# Altium footprint library header.PcbLib: 139 footprints (part 5 of 9)
Each footprint in its own frame and in the unit in brackets; x right, y up, seen from the top. Pads: shape width x height; smd on the part's side, far side on the other; paste and mask are expansions set on the pad; w line width, h text height; cw(c..) or ccw(c..) is an arc to the next point about the centre after c.
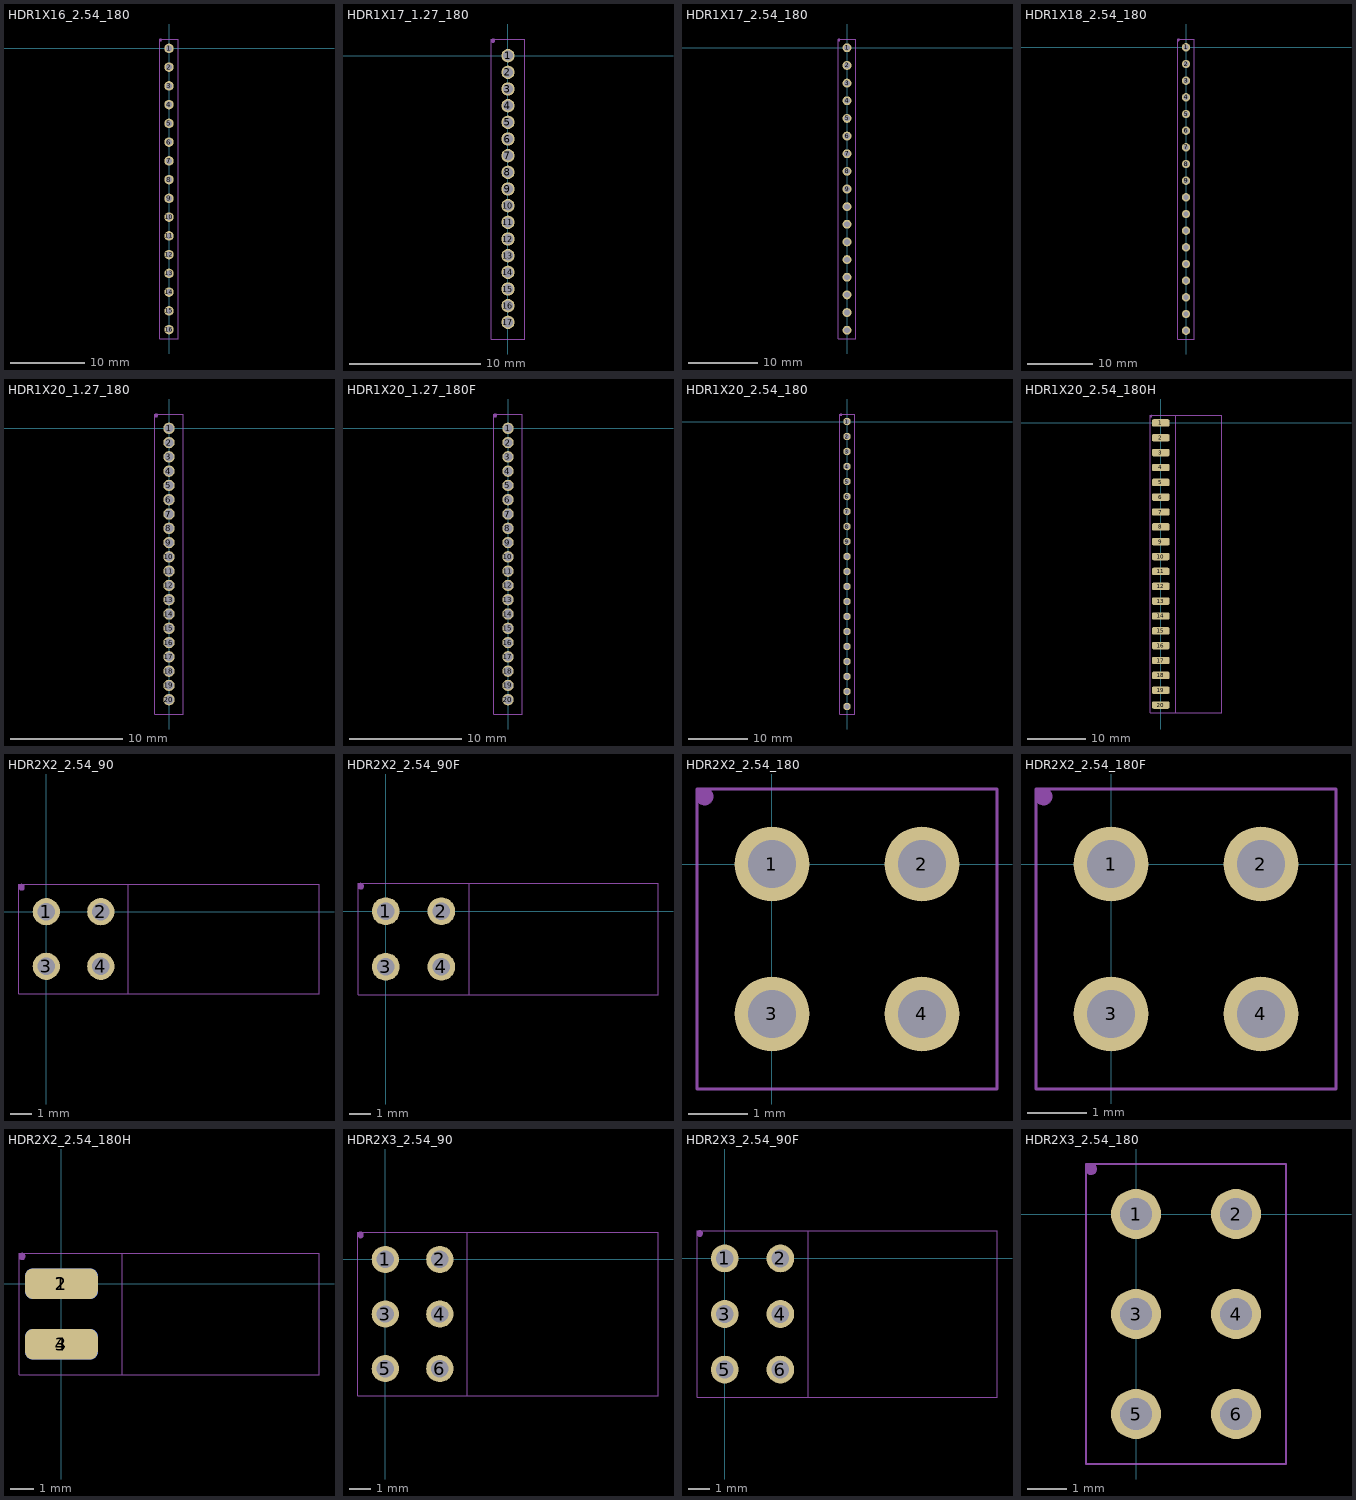
[diagram p4: the footprints below, top view; thin cyan lines are the x and y axes]

## HDR1X16_2.54_180 [mil]
height 169.29
pads (16):
  round 50 hole 32: 1(0,0) 2(0,-100) 3(0,-200) 4(0,-300) 5(0,-400) 6(0,-500) 7(0,-600) 8(0,-700) 9(0,-800) 10(0,-900) 11(0,-1000) 12(0,-1100) 13(0,-1200) 14(0,-1300) 15(0,-1400) 16(0,-1500)
Mechanical 13:
  lines w2: -50,-1550 -50,50 50,50 50,-1550 -50,-1550
Top Component (Mech14):
  circle w2: c-45,45 r5
  region: -45,40 -45.99,40 -47.83,40.76 -49.24,42.17 -50,44.01 -50,45 -50,45.99 -49.24,47.83 -47.83,49.24 -45.99,50 -45,50 -44.01,50 -42.17,49.24 -40.76,47.83 -40,45.99 -40,45 -40,44.01 -40.76,42.17 -42.17,40.76 -44.01,40
  lines w2: -50,-1550 -50,50 50,50 50,-1550 -50,-1550
  text ".Designator" at -31,-770 h80
3D body "pin_header_aw140-eg-g16d.stp": height 322.83, standoff -118.11, extent -49.18,-1550 49.18,50

## HDR1X17_1.27_180 [mil]
height 169.29
pads (17):
  round 40 hole 30: 1(0,0) 2(0,-50) 3(0,-100) 4(0,-150) 5(0,-200) 6(0,-250) 7(0,-300) 8(0,-350) 9(0,-400) 10(0,-450) 11(0,-500) 12(0,-550) 13(0,-600) 14(0,-650) 15(0,-700) 16(0,-750) 17(0,-800)
Mechanical 13:
  lines w2: -50,-850 50,-850 50,50 -50,50 -50,-850
Top Component (Mech14):
  circle w2: c-45,45 r5
  region: -45,40 -45.99,40 -47.83,40.76 -49.24,42.17 -50,44.01 -50,45 -50,45.99 -49.24,47.83 -47.83,49.24 -45.99,50 -45,50 -44.01,50 -42.17,49.24 -40.76,47.83 -40,45.99 -40,45 -40,44.01 -40.76,42.17 -42.17,40.76 -44.01,40
  lines w2: -50,-850 -50,50 50,50 50,-850 -50,-850
  text ".Designator" at -31,-420 h80
3D body "pin_header_a-sl127-eg-g17d.stp": height 210.24, standoff -102.36, extent -49.21,-824.99 49.21,25.01

## HDR1X17_2.54_180 [mil]
height 169.29
pads (17):
  round 50 hole 32: 1(0,0) 2(0,-100) 3(0,-200) 4(0,-300) 5(0,-400) 6(0,-500) 7(0,-600) 8(0,-700) 9(0,-800) 10(0,-900) 11(0,-1000) 12(0,-1100) 13(0,-1200) 14(0,-1300) 15(0,-1400) 16(0,-1500) 17(0,-1600)
Mechanical 13:
  lines w2: -50,-1650 50,-1650 50,50 -50,50 -50,-1650
Top Component (Mech14):
  circle w2: c-45,45 r5
  region: -45,40 -45.99,40 -47.83,40.76 -49.24,42.17 -50,44.01 -50,45 -50,45.99 -49.24,47.83 -47.83,49.24 -45.99,50 -45,50 -44.01,50 -42.17,49.24 -40.76,47.83 -40,45.99 -40,45 -40,44.01 -40.76,42.17 -42.17,40.76 -44.01,40
  lines w2: -50,-1650 50,-1650 50,50 -50,50 -50,-1650
  text ".Designator" at -31,-820 h80
3D body "pin_header_aw140-eg-g17d.stp": height 322.83, standoff -118.11, extent -49.18,-1650 49.18,50

## HDR1X18_2.54_180 [mil]
height 169.29
pads (18):
  round 50 hole 32: 1(0,0) 2(0,-100) 3(0,-200) 4(0,-300) 5(0,-400) 6(0,-500) 7(0,-600) 8(0,-700) 9(0,-800) 10(0,-900) 11(0,-1000) 12(0,-1100) 13(0,-1200) 14(0,-1300) 15(0,-1400) 16(0,-1500) 17(0,-1600) 18(0,-1700)
Mechanical 13:
  lines w2: -50,-1750 50,-1750 50,50 -50,50 -50,-1750
Top Component (Mech14):
  circle w2: c-45,45 r5
  region: -45,40 -45.99,40 -47.83,40.76 -49.24,42.17 -50,44.01 -50,45 -50,45.99 -49.24,47.83 -47.83,49.24 -45.99,50 -45,50 -44.01,50 -42.17,49.24 -40.76,47.83 -40,45.99 -40,45 -40,44.01 -40.76,42.17 -42.17,40.76 -44.01,40
  lines w2: -50,-1750 50,-1750 50,50 -50,50 -50,-1750
  text ".Designator" at -31,-870 h80
3D body "pin_header_aw140-eg-g18d.stp": height 322.83, standoff -118.11, extent -49.18,-1750 49.18,50

## HDR1X20_1.27_180 [mil]
height 169.29
pads (20):
  round 40 hole 30: 1(0,0) 2(0,-50) 3(0,-100) 4(0,-150) 5(0,-200) 6(0,-250) 7(0,-300) 8(0,-350) 9(0,-400) 10(0,-450) 11(0,-500) 12(0,-550) 13(0,-600) 14(0,-650) 15(0,-700) 16(0,-750) 17(0,-800) 18(0,-850) 19(-0.01,-900) 20(-0.01,-950)
Mechanical 13:
  lines w2: -50,-1000 50,-1000 50,50 -50,50 -50,-1000
Top Component (Mech14):
  circle w2: c-45,45 r5
  region: -45,40 -45.99,40 -47.83,40.76 -49.24,42.17 -50,44.01 -50,45 -50,45.99 -49.24,47.83 -47.83,49.24 -45.99,50 -45,50 -44.01,50 -42.17,49.24 -40.76,47.83 -40,45.99 -40,45 -40,44.01 -40.76,42.17 -42.17,40.76 -44.01,40
  lines w2: -50,-1000 50,-1000 50,50 -50,50 -50,-1000
  text ".Designator" at -31,-495 h80
3D body "pin_header_a-sl127-eg-g20d.stp": height 210.24, standoff -102.36, extent -49.65,-975 48.77,25

## HDR1X20_1.27_180F [mil]
height 169.29
pads (20):
  round 40 hole 30: 1(0,0) 2(0,-50) 3(0,-100) 4(0,-150) 5(0,-200) 6(0,-250) 7(0,-300) 8(0,-350) 9(0,-400) 10(0,-450) 11(0,-500) 12(0,-550) 13(0,-600) 14(0,-650) 15(0,-700) 16(0,-750) 17(0,-800) 18(0,-850) 19(-0.01,-900) 20(-0.01,-950)
Mechanical 13:
  lines w2: -50,-1000 -50,50 50,50 50,-1000 -50,-1000
Top Component (Mech14):
  circle w2: c-45,45 r5
  region: -45,40 -45.99,40 -47.83,40.76 -49.24,42.17 -50,44.01 -50,45 -50,45.99 -49.24,47.83 -47.83,49.24 -45.99,50 -45,50 -44.01,50 -42.17,49.24 -40.76,47.83 -40,45.99 -40,45 -40,44.01 -40.76,42.17 -42.17,40.76 -44.01,40
  lines w2: -50,-1000 -50,50 50,50 50,-1000 -50,-1000
  text ".Designator" at -31,-495 h80
3D body "female_header_a-bl127-eg-g20d.stp": height 133.86, standoff -94.49, extent -35.87,-982.88 35,32.88

## HDR1X20_2.54_180 [mil]
height 169.29
pads (20):
  round 50 hole 32: 1(0,0) 2(0,-100) 3(0,-200) 4(0,-300) 5(0,-400) 6(0,-500) 7(0,-600) 8(0,-700) 9(0,-800) 10(0,-900) 11(0,-1000) 12(0,-1100) 13(0,-1200) 14(0,-1300) 15(0,-1400) 16(0,-1500) 17(0,-1600) 18(0,-1700) 19(0,-1800) 20(0,-1900)
Mechanical 13:
  lines w2: -50,-1950 -50,50 50,50 50,-1950 -50,-1950
Top Component (Mech14):
  circle w2: c-40,45 r5
  region: -40,40 -40.99,40 -42.83,40.76 -44.24,42.17 -45,44.01 -45,45 -45,45.99 -44.24,47.83 -42.83,49.24 -40.99,50 -40,50 -39.01,50 -37.17,49.24 -35.76,47.83 -35,45.99 -35,45 -35,44.01 -35.76,42.17 -37.17,40.76 -39.01,40
  lines w2: -50,-1950 -50,50 50,50 50,-1950 -50,-1950
  text ".Designator" at -31,-970 h80
3D body "pin_header_aw140-eg-g20d.stp": height 322.83, standoff -118.11, extent -49.32,-1951.06 49.05,48.94

## HDR1X20_2.54_180H [mil]
height 169.29
pads (20):
  rrect50% 120x50 smd: 1(0,0) 2(0,-100) 3(0,-200) 4(0,-300) 5(0,-400) 6(0,-500) 7(0,-600) 8(0,-700) 9(0,-800) 10(0,-900) 11(0,-1000) 12(0,-1100) 13(0,-1200) 14(0,-1300) 15(0,-1400) 16(0,-1500) 17(0,-1600) 18(0,-1700) 19(0,-1800) 20(0,-1900)
Mechanical 13:
  lines w2: -70,-1950 -70,50 410,50 410,-1950 -70,-1950
Top Component (Mech14):
  circle w2: c-65,45 r5
  region: -65,40 -65.99,40 -67.83,40.76 -69.24,42.17 -70,44.01 -70,45 -70,45.99 -69.24,47.83 -67.83,49.24 -65.99,50 -65,50 -64.01,50 -62.17,49.24 -60.76,47.83 -60,45.99 -60,45 -60,44.01 -60.76,42.17 -62.17,40.76 -64.01,40
  lines w2: -70,-1950 -70,50 100,50 100,-1950 -70,-1950
  text ".Designator" at -31,-970 h80
3D body "pin_header_aw140-eg-g20d.stp": height 49.32, standoff -49.05, extent -35,-1950 405.94,50

## HDR2X2_2.54_90 [mil]
height 169.29
pads (4):
  round 50 hole 32: 1(0,0) 2(100,0) 3(0,-100) 4(100,-100)
Mechanical 13:
  lines w2: -50,-150 500,-150 500,50 -50,50 -50,-150
Top Component (Mech14):
  circle w2: c-45,45 r5
  region: -45,40 -45.99,40 -47.83,40.76 -49.24,42.17 -50,44.01 -50,45 -50,45.99 -49.24,47.83 -47.83,49.24 -45.99,50 -45,50 -44.01,50 -42.17,49.24 -40.76,47.83 -40,45.99 -40,45 -40,44.01 -40.76,42.17 -42.17,40.76 -44.01,40
  lines w2: -50,-150 150,-150 150,50 -50,50 -50,-150
  text ".Designator" at 19,-70 h80
3D body "pin_header_awl254-da-g04d.stp": height 198.43, standoff -116.54, extent -10,-150 497.09,50

## HDR2X2_2.54_90F [mil]
height 169.29
pads (4):
  round 50 hole 32: 1(0,0) 2(100,0) 3(0,-100) 4(100,-100)
Mechanical 13:
  lines w2: -50,-150 -50,50 490,50 490,-150 -50,-150
Top Component (Mech14):
  circle w2: c-45,45 r5
  region: -45,40 -45.99,40 -47.83,40.76 -49.24,42.17 -50,44.01 -50,45 -50,45.99 -49.24,47.83 -47.83,49.24 -45.99,50 -45,50 -44.01,50 -42.17,49.24 -40.76,47.83 -40,45.99 -40,45 -40,44.01 -40.76,42.17 -42.17,40.76 -44.01,40
  lines w2: -50,-150 150,-150 150,50 -50,50 -50,-150
  text ".Designator" at 19,-70 h80
3D body "female_header_a-bl254-da-g04d.stp": height 198.43, standoff -124.41, extent -10,-154.92 486.06,54.92

## HDR2X2_2.54_180 [mil]
height 169.29
pads (4):
  round 50 hole 32: 1(0,0) 2(100,0) 3(0,-100) 4(100,-100)
Mechanical 13:
  lines w2: -50,-150 150.01,-150 150.01,50 -50,50 -50,-150
Top Component (Mech14):
  circle w2: c-45,45 r5
  region: -45,40 -45.99,40 -47.83,40.76 -49.24,42.17 -50,44.01 -50,45 -50,45.99 -49.24,47.83 -47.83,49.24 -45.99,50 -45,50 -44.01,50 -42.17,49.24 -40.76,47.83 -40,45.99 -40,45 -40,44.01 -40.76,42.17 -42.17,40.76 -44.01,40
  lines w2: -50,-150 -50,50 150,50 150,-150 -50,-150
  text ".Designator" at 19,-70 h80
3D body "pin_header_awl254-dg-g04d.stp": height 334.65, standoff -118.11, extent -49.99,-150 150.01,50

## HDR2X2_2.54_180F [mil]
height 169.29
pads (4):
  round 50 hole 32: 1(0,0) 2(100,0) 3(0,-100) 4(100,-100)
Mechanical 13:
  lines w2: -50,-150 150,-150 150,50 -50,50 -50,-150
Top Component (Mech14):
  circle w2: c-45,45 r5
  region: -45,40 -45.99,40 -47.83,40.76 -49.24,42.17 -50,44.01 -50,45 -50,45.99 -49.24,47.83 -47.83,49.24 -45.99,50 -45,50 -44.01,50 -42.17,49.24 -40.76,47.83 -40,45.99 -40,45 -40,44.01 -40.76,42.17 -42.17,40.76 -44.01,40
  lines w2: -50,-150 -50,50 150,50 150,-150 -50,-150
  text ".Designator" at 19,-70 h80
3D body "female_header_a-bl254-dg-g04d.stp": height 334.65, standoff -125.98, extent -48.42,-154.93 148.43,54.92

## HDR2X2_2.54_180H [mil]
height 169.29
pads (4):
  rrect50% 120x50 smd: 1(0,0) 3(0,-100)
  rrect50% 120x50 smd far side: 2(0,0) 4(0,-100)
Mechanical 13:
  lines w2: -70,-150 -70,50 425,50 425,-150 -70,-150
Top Component (Mech14):
  circle w2: c-65,45 r5
  region: -65,40 -65.99,40 -67.83,40.76 -69.24,42.17 -70,44.01 -70,45 -70,45.99 -69.24,47.83 -67.83,49.24 -65.99,50 -65,50 -64.01,50 -62.17,49.24 -60.76,47.83 -60,45.99 -60,45 -60,44.01 -60.76,42.17 -62.17,40.76 -64.01,40
  lines w2: -70,-150 -70,50 100,50 100,-150 -70,-150
  text ".Designator" at -31,-70 h80
Bottom Component (Mech15):
  lines w2: -70,-150 -70,50 100,50 100,-150 -70,-150
3D body "pin_header_awl254-dg-g04d.stp": height 78, standoff -122, extent -38.11,-149.99 414.65,50.01

## HDR2X3_2.54_90 [mil]
height 169.29
pads (6):
  round 50 hole 32: 1(0,0) 2(100,0) 3(0,-100) 4(100,-100) 5(0,-200) 6(100,-200)
Mechanical 13:
  lines w2: -50,-250 500,-250 500,50 -50,50 -50,-250
Top Component (Mech14):
  circle w2: c-45,45 r5
  region: -45,40 -45.99,40 -47.83,40.76 -49.24,42.17 -50,44.01 -50,45 -50,45.99 -49.24,47.83 -47.83,49.24 -45.99,50 -45,50 -44.01,50 -42.17,49.24 -40.76,47.83 -40,45.99 -40,45 -40,44.01 -40.76,42.17 -42.17,40.76 -44.01,40
  lines w2: -50,-250 -50,50 150,50 150,-250 -50,-250
  text ".Designator" at 19,-120 h80
3D body "pin_header_awl254-da-g06d.stp": height 198.43, standoff -116.54, extent -10,-250 497.09,50

## HDR2X3_2.54_90F [mil]
height 169.29
pads (6):
  round 50 hole 32: 1(0,0) 2(100,0) 3(0,-100) 4(100,-100) 5(0,-200) 6(100,-200)
Mechanical 13:
  lines w2: -50,-250 -50,50 490,50 490,-250 -50,-250
Top Component (Mech14):
  circle w2: c-45,45 r5
  region: -45,40 -45.99,40 -47.83,40.76 -49.24,42.17 -50,44.01 -50,45 -50,45.99 -49.24,47.83 -47.83,49.24 -45.99,50 -45,50 -44.01,50 -42.17,49.24 -40.76,47.83 -40,45.99 -40,45 -40,44.01 -40.76,42.17 -42.17,40.76 -44.01,40
  lines w2: -50,-250 -50,50 150,50 150,-250 -50,-250
  text ".Designator" at 19,-120 h80
3D body "female_header_a-bl254-da-g06d.stp": height 198.43, standoff -124.41, extent -10,-254.92 486.06,54.92

## HDR2X3_2.54_180 [mil]
height 169.29
pads (6):
  round 50 hole 32: 1(0,0) 2(100,0) 3(0,-100) 4(100,-100) 5(0,-200) 6(100,-200)
Mechanical 13:
  lines w2: -50,-250 150,-250 150,50 -50,50 -50,-250
Top Component (Mech14):
  circle w2: c-45,45 r5
  region: -45,40 -45.99,40 -47.83,40.76 -49.24,42.17 -50,44.01 -50,45 -50,45.99 -49.24,47.83 -47.83,49.24 -45.99,50 -45,50 -44.01,50 -42.17,49.24 -40.76,47.83 -40,45.99 -40,45 -40,44.01 -40.76,42.17 -42.17,40.76 -44.01,40
  lines w2: -50,-250 150,-250 150,50 -50,50 -50,-250
  text ".Designator" at 19,-120 h80
3D body "pin_header_awl254-dg-g06d.stp": height 334.65, standoff -118.11, extent -50,-249.99 150,50